# Altium schematic symbol library 2×5P插针.SCHLIB: 1 symbol
Pins are listed as number, name and electrical type; pins without a type are passive.

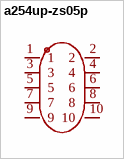
[diagram p0: symbol a254up-zs05p]

## a254up-zs05p
designator H??  (value not drawn)
插针结构:2x5P;间距:2.54mm;行距:2.54mm;圆针/方针:方针;安装方式:直插;排数:双排;总PIN位数:10P;额定电流:3A;配合针长度:6mm;塑高:2.5mm;触头材质:铜合金;触头镀层:金;工作温度:-40℃~+105℃;颜色:黑色;; Manufacturer: BXCONN(宝讯); AddInBom: yes; ModelId: c4cfba895466416fb2f10be924625d31; ModelName: HDR-TH_10P-P2.54-V-M-R2-C5-S2.54; ModelTransform: 500.00294,196.85,0,0,0,0,0,0,-118.11; Pin Structure: 2x5P; Pitch: 2.54mm; Circluar Pins/Square Pins: 方针; Current Rating: 3A; Symbol: A254UP-ZS05P; LCSC Part Name: 2x5P 间距:2.54mm 方针 直插; SupplierPart: C41413842; ManufacturerPart: A254UP-ZS05P; Supplier Footprint: 插件,P=2.54mm; JLCPCB Part Class: Extended Part; Datasheet: https://item.szlcsc.com/datasheet/A254UP-ZS05P/43230049.html; Supplier: LCSC; ConvertToPcb: yes; FootprintName: HDR-TH_10P-P2.54-V-M-R2-C5-S2.54; Row Spacing: 2.54mm; Mounting Type: 直插; Number of Rows: 双排; Number of Pins: 10P; Length of Mating Pin: 6mm; Insulation Height: 2.5mm; Contact Material: 铜合金; Contact Plating: 金; Operating Temperature: -40℃~+105℃; Color: 黑色
footprint HDR-TH_10P-P2.54-V-M-R2-C5-S2.54
pins: 1, 2, 3, 4, 5, 6, 7, 8, 9, 10